# Altium footprint library Amin-Library.PcbLib: 601 footprints (part 18 of 38)
Each footprint in its own frame and in the unit in brackets; x right, y up, seen from the top. Pads: shape width x height; smd on the part's side, far side on the other; paste and mask are expansions set on the pad; w line width, h text height; cw(c..) or ccw(c..) is an arc to the next point about the centre after c.
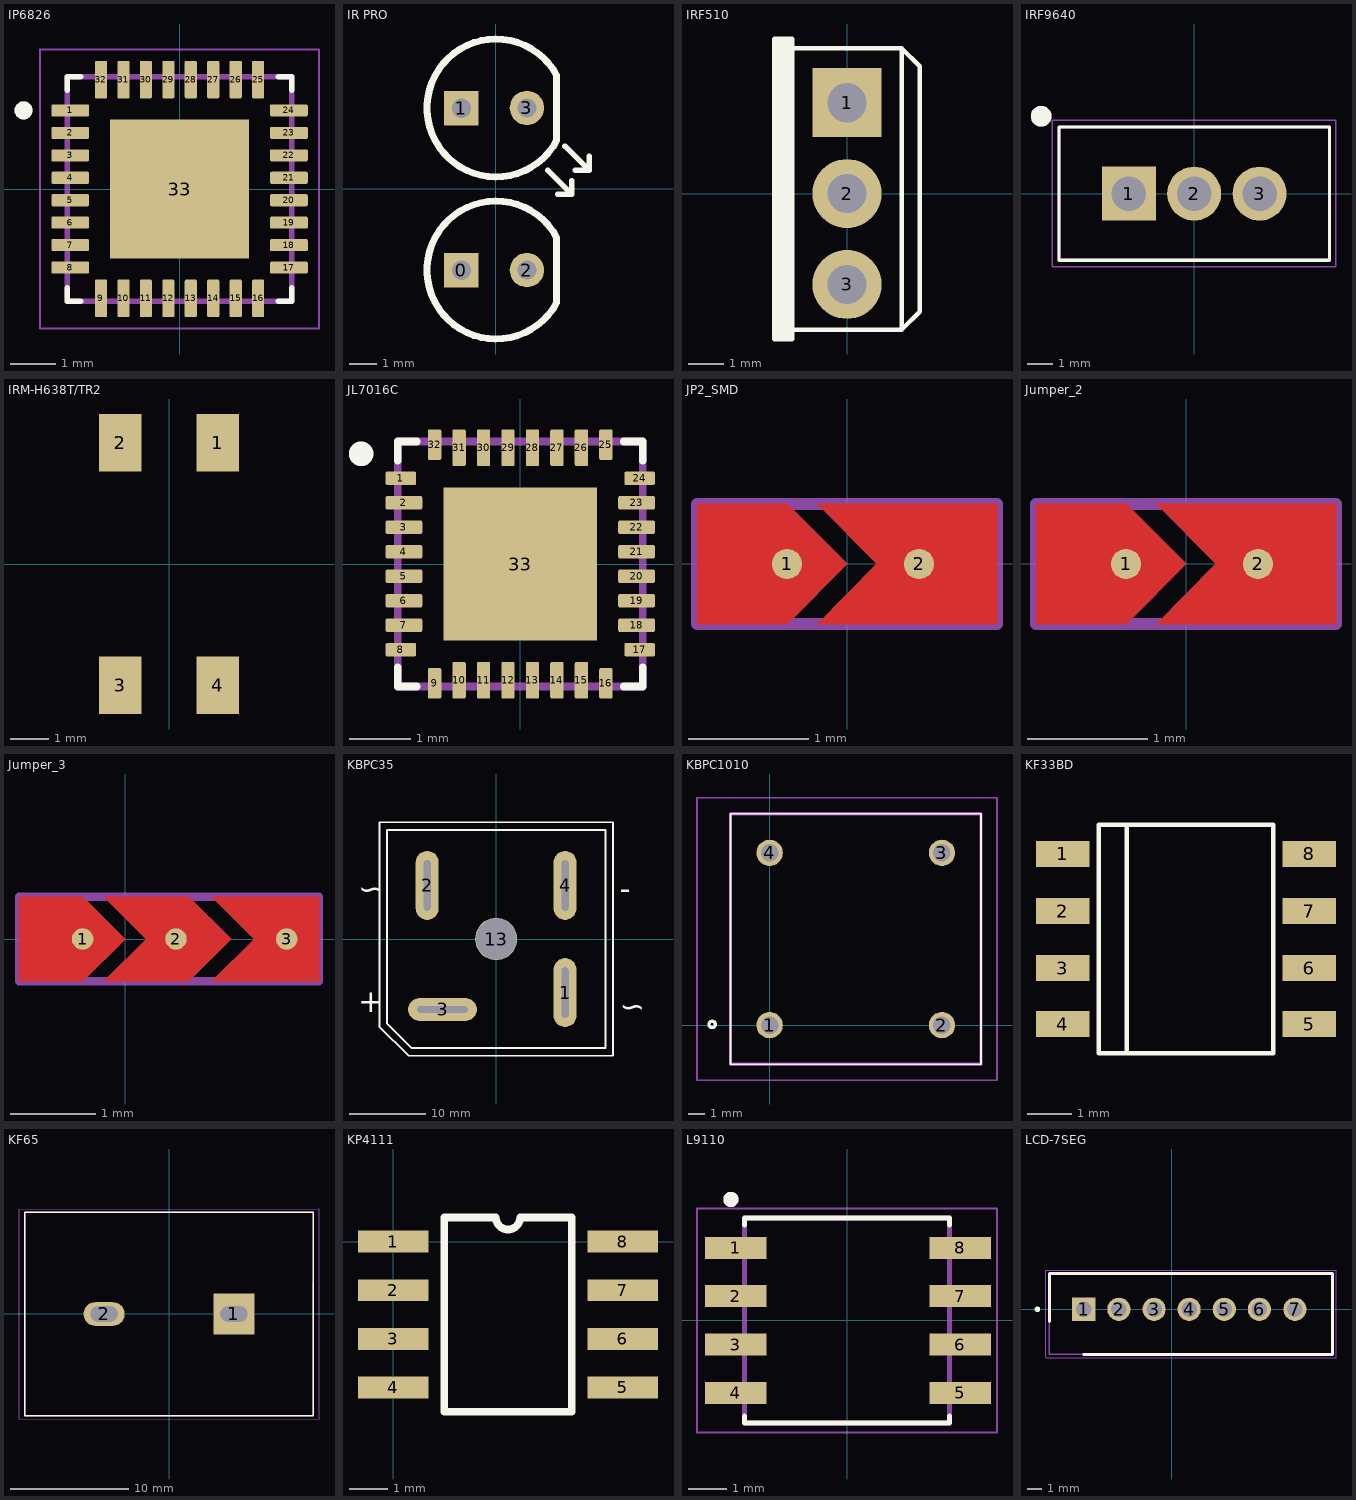
[diagram p17: the footprints below, top view; thin cyan lines are the x and y axes]

## IP6826 [mm] "15w Wirless charger ic"
pads (33):
  rrect25% 0.84x0.27 smd: 1(-2.435,1.75) 2(-2.435,1.25) 3(-2.435,0.75) 4(-2.435,0.25) 5(-2.435,-0.25) 6(-2.435,-0.75) 7(-2.435,-1.25) 8(-2.435,-1.75) 17(2.435,-1.75) 18(2.435,-1.25) 19(2.435,-0.75) 20(2.435,-0.25) 21(2.435,0.25) 22(2.435,0.75) 23(2.435,1.25) 24(2.435,1.75)
  rrect25% 0.27x0.84 smd: 9(-1.75,-2.435) 10(-1.25,-2.435) 11(-0.75,-2.435) 12(-0.25,-2.435) 13(0.25,-2.435) 14(0.75,-2.435) 15(1.25,-2.435) 16(1.75,-2.435) 25(1.75,2.435) 26(1.25,2.435) 27(0.75,2.435) 28(0.25,2.435) 29(-0.25,2.435) 30(-0.75,2.435) 31(-1.25,2.435) 32(-1.75,2.435)
  rect 3.1x3.1 smd paste-3: 33(0,0)
Top Overlay:
  circle w0.2: c-3.475,1.75 r0.1
  lines w0.127: -2.5,-2.205 -2.5,-2.5 -2.205,-2.5 ; -2.5,2.205 -2.5,2.5 -2.205,2.5 ; 2.205,-2.5 2.5,-2.5 2.5,-2.205 ; 2.205,2.5 2.5,2.5 2.5,2.205
Top Paste:
  region: 0.98,-0.98 -0.98,-0.98 -0.98,0.98 0.98,0.98
Mechanical 13:
  circle w0.2: c-3.475,1.75 r0.1
  lines w0.127: -2.5,-2.5 -2.5,2.5 2.5,2.5 2.5,-2.5 -2.5,-2.5
Mechanical 15:
  lines w0.05: -3.105,-3.105 -3.105,3.105 3.105,3.105 3.105,-3.105 -3.105,-3.105
3D body "User Library-qfn32-5x5.step": height 0.8, standoff 0, extent -2.52,-2.51 2.5,2.51

## IR PRO [mil]
pads (4):
  rect 50x50 hole 28: 0(-50,-118) 1(-50,117)
  round 50 hole 28: 2(45,-117.8) 3(45,117.2)
Top Overlay:
  lines w8: 75,27 110,-8 ; 90,-8 110,-8 ; 100,62 135,27 ; 110,12 110,-8 ; 115,27 135,27 ; 135,47 135,27
  lines w10: 88.1,-165.19 cw(c0.04,-117.8) 88.1,-70.42 88.1,-165.19 ; 88.1,69.81 cw(c0.04,117.2) 88.1,164.58 88.1,69.81

## IRF510 [mil]
pads (3):
  rect 76x76 hole 43.31: 1(0,100)
  round 76 hole 43.31: 2(0,0) 3(0,-100)
Top Overlay:
  region: -60,-160 -80,-160 -80,170 -60,170
  lines w5: -60,-150 60,-150 ; -60,-150 -60,160 ; -60,-150 -60,-160 -80,-160 -80,170 -60,170 -60,160 ; -60,160 60,160 ; 60,-150 60,160 ; 60,-150 80,-130 80,140 60,160
3D body "step_temp.STEP": height 781, standoff -401, extent -110,-200 65,197.5

## IRF9640 [mm]
pads (3):
  rect 2.1x2.1 hole 1.34: 1(-2.54,0)
  round 2.1 hole 1.34: 2(0,0) 3(2.54,0)
Top Overlay:
  circle w0.4: c-5.95,3.01 r0.2
  lines w0.127: -5.26,-2.59 -5.26,2.59 5.26,2.59 5.26,-2.59 -5.26,-2.59
Mechanical 13:
  circle w0.4: c-5.95,3.01 r0.2
  lines w0.127: -5.26,-2.59 -5.26,2.59 5.26,2.59 5.26,-2.59 -5.26,-2.59
Mechanical 15:
  lines w0.05: -5.51,-2.845 5.51,-2.845 5.51,2.845 -5.51,2.845 -5.51,-2.845
3D body "step_temp.STEP": height 19.84, standoff -10.19, extent -5.048,-1.778 5.048,2.667

## IRM-H638T/TR2 [mm]
pads (4):
  rect 1.1x1.5 smd: 1(1.27,3.15) 2(-1.27,3.15) 3(-1.27,-3.15) 4(1.27,-3.15)
3D body "IRM-H636.STEP": height 3.99, standoff -0.06, extent -2.643,-3.515 2.717,3.5

## JL7016C [mm] "QFN32 4*4"
height 4.32
pads (33):
  rrect25% 0.5x0.22 smd mask-2539.97: 1(-1.95,1.4) 8(-1.95,-1.4) 17(1.95,-1.4) 24(1.95,1.4)
  rrect25% 0.6x0.22 smd mask-2539.97: 2(-1.9,1) 3(-1.9,0.6) 4(-1.9,0.2) 5(-1.9,-0.2) 6(-1.9,-0.6) 7(-1.9,-1) 18(1.9,-1) 19(1.9,-0.6) 20(1.9,-0.2) 21(1.9,0.2) 22(1.9,0.6) 23(1.9,1)
  rrect25% 0.22x0.5 smd mask-2539.97: 9(-1.4,-1.95) 16(1.4,-1.95) 25(1.4,1.95) 32(-1.4,1.95)
  rrect25% 0.22x0.6 smd mask-2539.97: 10(-1,-1.9) 11(-0.6,-1.9) 12(-0.2,-1.9) 13(0.2,-1.9) 14(0.6,-1.9) 15(1,-1.9) 26(1,1.9) 27(0.6,1.9) 28(0.2,1.9) 29(-0.2,1.9) 30(-0.6,1.9) 31(-1,1.9)
  rect 2.5x2.5 smd paste-2: 33(0,0)
Top Overlay:
  circle w0.3: c-2.6,1.8 r0.05
  lines w0.127: -2,-1.69 -2,-2 -1.69,-2 ; -2,1.69 -2,2 -1.69,2 ; 1.69,-2 2,-2 2,-1.69 ; 1.69,2 2,2 2,1.69
Top Paste:
  rectangle: 0.7,0.7 1.1,1.1
  rectangle: 0.1,0.7 0.5,1.1
  rectangle: -0.5,0.7 -0.1,1.1
  rectangle: -1.1,0.7 -0.7,1.1
  rectangle: 0.7,0.1 1.1,0.5
  rectangle: 0.1,0.1 0.5,0.5
  rectangle: -0.5,0.1 -0.1,0.5
  rectangle: -1.1,0.1 -0.7,0.5
  rectangle: 0.7,-0.5 1.1,-0.1
  rectangle: 0.1,-0.5 0.5,-0.1
  rectangle: -0.5,-0.5 -0.1,-0.1
  rectangle: -1.1,-0.5 -0.7,-0.1
  rectangle: 0.7,-1.1 1.1,-0.7
  rectangle: 0.1,-1.1 0.5,-0.7
  rectangle: -0.5,-1.1 -0.1,-0.7
  rectangle: -1.1,-1.1 -0.7,-0.7
Top Solder:
  region: -2.25,1.25 -2.25,1.55 -1.65,1.55 -1.65,1.25
  region: -2.265,0.85 -2.265,1.15 -1.535,1.15 -1.535,0.85
  region: -2.265,0.45 -2.265,0.75 -1.535,0.75 -1.535,0.45
  region: -2.265,0.05 -2.265,0.35 -1.535,0.35 -1.535,0.05
  region: -2.265,-0.35 -2.265,-0.05 -1.535,-0.05 -1.535,-0.35
  region: -2.265,-0.75 -2.265,-0.45 -1.535,-0.45 -1.535,-0.75
  region: -2.265,-1.15 -2.265,-0.85 -1.535,-0.85 -1.535,-1.15
  region: -2.25,-1.55 -2.25,-1.25 -1.65,-1.25 -1.65,-1.55
  region: 0.85,1.55 0.85,2.25 1.15,2.25 1.15,1.55
  region: 0.45,1.55 0.45,2.25 0.75,2.25 0.75,1.55
  region: 0.05,1.55 0.05,2.25 0.35,2.25 0.35,1.55
  region: -0.35,1.55 -0.35,2.25 -0.05,2.25 -0.05,1.55
  region: -0.75,1.55 -0.75,2.25 -0.45,2.25 -0.45,1.55
  region: -1.15,1.55 -1.15,2.25 -0.85,2.25 -0.85,1.55
  region: -1.55,-2.25 -1.55,-1.65 -1.25,-1.65 -1.25,-2.25
  region: -1.15,-2.25 -1.15,-1.55 -0.85,-1.55 -0.85,-2.25
  region: -0.75,-2.25 -0.75,-1.55 -0.45,-1.55 -0.45,-2.25
  region: -0.35,-2.25 -0.35,-1.55 -0.05,-1.55 -0.05,-2.25
  region: 0.05,-2.25 0.05,-1.55 0.35,-1.55 0.35,-2.25
  region: 0.45,-2.25 0.45,-1.55 0.75,-1.55 0.75,-2.25
  region: 0.85,-2.25 0.85,-1.55 1.15,-1.55 1.15,-2.25
  region: 1.25,-2.25 1.25,-1.65 1.55,-1.65 1.55,-2.25
  region: 1.55,-1.15 1.55,-0.85 2.25,-0.85 2.25,-1.15
  region: 1.65,-1.55 1.65,-1.25 2.25,-1.25 2.25,-1.55
  region: 1.55,-0.75 1.55,-0.45 2.25,-0.45 2.25,-0.75
  region: 1.55,-0.35 1.55,-0.05 2.25,-0.05 2.25,-0.35
  region: 1.55,0.05 1.55,0.35 2.25,0.35 2.25,0.05
  region: 1.55,0.45 1.55,0.75 2.25,0.75 2.25,0.45
  region: 1.55,0.85 1.55,1.15 2.25,1.15 2.25,0.85
  region: 1.65,1.25 1.65,1.55 2.25,1.55 2.25,1.25
  region: -1.55,1.65 -1.55,2.25 -1.25,2.25 -1.25,1.65
  region: 1.25,1.65 1.25,2.25 1.55,2.25 1.55,1.65
Top Courtyard:
  lines w0.02: -2,-2 2,-2 2,2 -2,2 -2,-2
Mechanical 13:
  lines w0.127: -2,-2 -2,2 2,2 2,-2 -2,-2
3D body "step_temp.STEP": height 0.55, standoff 0, extent -2,-2 2,2

## JP2_SMD [mil]
pads (2):
  round 10 smd paste-10 mask+3.94: 1(-19.68,0) 2(23.62,0)
Top Layer:
  region: -19.68,19.68 -49.21,19.68 -49.21,-19.69 -19.68,-19.69 0,0
  region: -9.84,-19.69 49.21,-19.69 49.21,19.68 -9.84,19.68 9.84,0
Top Solder:
  region: -49.21,-19.69 49.21,-19.69 49.21,19.68 -49.21,19.68
Mechanical 3:
  region: -19.68,19.68 -49.21,19.68 -49.21,-19.69 -19.68,-19.69 0,0
  region: -9.84,-19.69 49.21,-19.69 49.21,19.68 -9.84,19.68 9.84,0
Mechanical 4:
  lines w3.94: -49.21,-19.69 -49.21,19.68 49.21,19.68 49.21,-19.69 -49.21,-19.69

## Jumper_2 [mil]
pads (2):
  round 10 smd paste-10 mask+3.94: 1(-19.68,0) 2(23.62,0)
Top Layer:
  region: -9.84,-19.69 49.21,-19.69 49.21,19.68 -9.84,19.68 9.84,0
  region: -19.68,19.68 -49.21,19.68 -49.21,-19.69 -19.68,-19.69 0,0
Top Solder:
  region: -49.21,-19.69 49.21,-19.69 49.21,19.68 -49.21,19.68
Mechanical 3:
  region: -9.84,-19.69 49.21,-19.69 49.21,19.68 -9.84,19.68 9.84,0
  region: -19.68,19.68 -49.21,19.68 -49.21,-19.69 -19.68,-19.69 0,0
Mechanical 4:
  lines w3.94: -49.21,-19.69 49.21,-19.69 49.21,19.68 -49.21,19.68 -49.21,-19.69

## Jumper_3 [mil]
pads (3):
  round 10 smd paste-10 mask+3.94: 1(-19.68,0) 2(23.62,0) 3(75,0)
Top Layer:
  region: -9.84,-19.69 29.53,-19.69 49.21,0 29.53,19.69 -9.84,19.68 9.84,0
  region: -19.68,19.68 -49.21,19.68 -49.21,-19.69 -19.68,-19.69 0,0
  region: 40.31,-19.69 90,-19.69 90,19.68 40.31,19.68 60,0
Top Solder:
  region: -49.21,-19.69 90,-19.69 90,19.68 -49.21,19.68
Mechanical 3:
  region: -9.84,-19.69 29.53,-19.69 49.22,0 29.53,19.69 -9.84,19.68 9.84,0
  region: -19.68,19.68 -49.21,19.68 -49.21,-19.69 -19.68,-19.69 0,0
  region: 40.31,-19.69 90,-19.69 90,19.68 40.31,19.68 60,0
Mechanical 4:
  lines w3.94: -49.21,-19.69 90,-19.69 90,19.68 -49.21,19.68 -49.21,-19.69

## KBPC35 [mm]
pads (5):
  oval 3x9 hole 0.9 slot 6.6 at 90 deg: 1(9,-7) 2(-9,7) 4(9,7)
  oval 9x3 hole 0.9 slot 6.6 at 0 deg: 3(-7,-9.2)
  round 5.5 hole 5.3: 13(0,0)
Top Overlay:
  lines w0.254: -15.24,-11.43 -15.24,15.24 15.24,15.24 15.24,-15.24 -11.43,-15.24 -15.24,-11.43 ; -14.25,-11.023 -11.023,-14.25 14.25,-14.25 14.25,14.25 -14.25,14.25 -14.25,-11.023
  text "-" at 16.129,8.347 h5
  text "~" at 16.129,-6.691 h5
  text "+" at -18.034,-6.015 h5
  text "~" at -18.034,8.626 h5
3D body "KBPC3510.STEP": height 23.4, standoff 0, extent -14.275,-14.275 14.275,14.275

## KBPC1010 [mm]
pads (4):
  round 1.65 hole 1.1: 1(0,0) 2(10.8,0) 3(10.8,10.8) 4(0,10.8)
Top Overlay:
  lines w0.1: -2.45,-2.45 13.25,-2.45 13.25,13.25 -2.45,13.25 -2.45,-2.45
  lines w0.2: -3.6,-0.15 ccw(c-3.6,0.05) -3.6,0.25 ; -3.6,-0.15 cw(c-3.6,0.05) -3.6,0.25 ; -3.6,-0.15 ccw(c-3.6,0.05) -3.6,0.25
Mechanical 13:
  lines w0.2: -2.45,-2.45 13.25,-2.45 13.25,13.25 -2.45,13.25 -2.45,-2.45
Mechanical 15:
  lines w0.1: -4.55,-3.45 14.25,-3.45 14.25,14.25 -4.55,14.25 -4.55,-3.45
3D body "KBPC1010.stp": height 5.5, standoff -5, extent -2.45,-2.45 13.25,13.25

## KF33BD [mm]
pads (8):
  rect 1.2x0.58 smd: 1(1.2,-2.05) 2(1.2,-3.325) 3(1.2,-4.6) 4(1.2,-5.85) 5(6.7,-5.85) 6(6.7,-4.6) 7(6.7,-3.325) 8(6.7,-2.05)
Top Overlay:
  lines w0.1: 2.625,-6.5 2.625,-1.4 ; 2,-6.5 2,-1.4 5.9,-1.4 5.9,-6.5 2,-6.5
3D body "KF33BD.step": height 1.45, standoff 0, extent 1.111,-6.4 6.889,-1.498

## KF65 [mm]
pads (2):
  rect 3.5x3.5 hole 1.3 slot 2.3 at 0 deg: 1(5.5,0)
  oval 3.5x2 hole 1.3 slot 2.3 at 0 deg: 2(-5.5,0)
Top Overlay:
  circle w0.2: c4.632,-0.077 r0.1
  lines w0.127: -12.2,-8.6 -12.2,8.6 12.2,8.6 12.2,-8.6 -12.2,-8.6
Mechanical 13:
  circle w0.2: c4.632,-0.077 r0.1
  lines w0.127: 12.2,2.673 12.2,-8.6 -12.2,-8.6 -12.2,8.6 12.2,8.6
Mechanical 15:
  lines w0.05: -12.7,8.854 -12.7,-8.89 12.7,-8.89 12.7,8.89 -12.7,8.89

## KP4111 [mm] "Secondary Side Synchronous Rectifier  SOP-8"
height 1.91
pads (8):
  rect 1.85x0.575 smd: 1(0,0) 2(0,-1.27) 3(0,-2.54) 4(0,-3.81) 5(6,-3.81) 6(6,-2.54) 7(6,-1.27) 8(6,0)
Top Overlay:
  lines w0.2: 1.335,-4.445 4.665,-4.445 4.665,0.635 3.317,0.635 cw(c3,0.635) 2.682,0.635 1.335,0.635 1.335,-4.445
3D body "User Library-sop8_model.STEP": height 1.55, standoff -0.01, extent 0.084,-4.316 6.064,0.584

## L9110 [mm]
pads (8):
  rect 1.61x0.58 smd: 1(-2.921,1.905) 2(-2.921,0.635) 3(-2.921,-0.635) 4(-2.921,-1.905) 5(2.97,-1.905) 6(2.97,-0.635) 7(2.97,0.635) 8(2.97,1.905)
Top Overlay:
  circle w0.2: c-3.048,3.175 r0.1
  lines w0.127: -2.69,-2.51 -2.69,-2.69 2.69,-2.69 2.69,-2.51 ; -2.69,2.5 -2.69,2.69 2.69,2.69 2.69,2.5
Mechanical 4:
  circle w0.2: c-3.048,3.175 r0.1
  circle w0.2: c-3.048,3.175 r0.1
  lines w0.127: -2.69,-2.69 -2.69,2.69 ; -2.69,-2.69 2.69,-2.69 ; -2.69,-2.69 -2.69,2.69 ; -2.69,-2.69 2.69,-2.69 ; -2.69,2.69 2.69,2.69 ; -2.69,2.69 2.69,2.69 ; 2.69,-2.69 2.69,2.69 ; 2.69,-2.69 2.69,2.69
Mechanical 16:
  lines w0.05: -3.937,-2.94 -3.937,2.94 3.937,2.94 3.937,-2.94 -3.937,-2.94
3D body "User Library-so8-3.STEP": height 1.7, standoff 0, extent -3,-2.45 3,2.45

## LCD-7SEG [mm]
pads (7):
  rect 1.65x1.65 hole 1.1: 1(-6.27,0)
  round 1.65 hole 1.1: 2(-3.77,0) 3(-1.27,0) 4(1.23,0) 5(3.73,0) 6(6.23,0) 7(8.763,0)
Top Overlay:
  circle w0.2: c-9.572,0 r0.1
  lines w0.2: -8.72,-0.86 -8.72,2.54 11.43,2.54 11.43,-3.21 -6.27,-3.21
Mechanical 13:
  lines w0.1: -8.72,-3.21 -8.72,2.54 11.43,2.54 11.43,-3.21 -8.72,-3.21
Mechanical 15:
  lines w0.05: -8.97,-3.46 -8.97,2.79 11.684,2.79 11.684,-3.46 -8.97,-3.46
3D body "end-el-san Co Ltd-King Bright CX25-12.step": height 11.01, standoff 0.01, extent -16.984,-6.477 19.016,2.523